# Altium footprint library footprints.PcbLib: 65 footprints (part 5 of 5)
Each footprint in its own frame and in the unit in brackets; x right, y up, seen from the top. Pads: shape width x height; smd on the part's side, far side on the other; paste and mask are expansions set on the pad; w line width, h text height; cw(c..) or ccw(c..) is an arc to the next point about the centre after c.
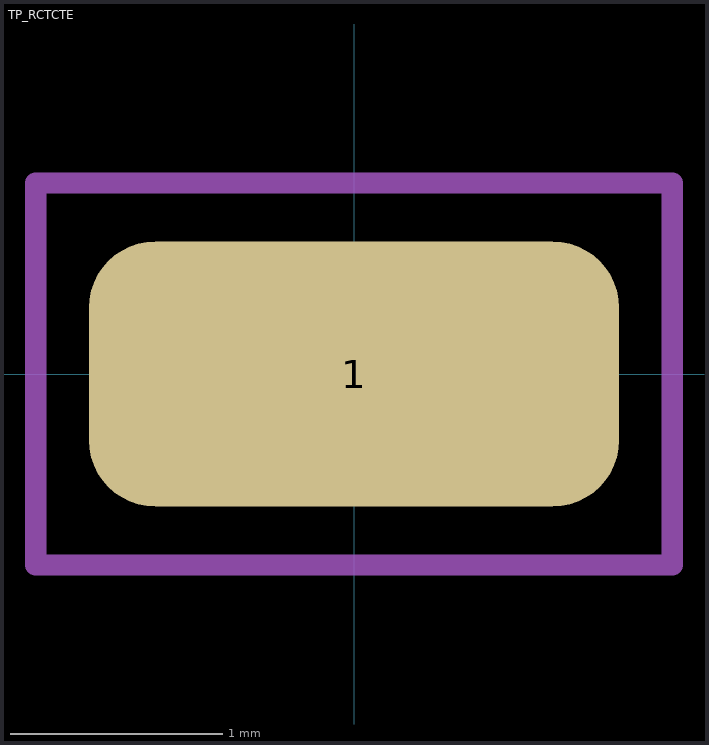
[diagram p4: the footprint, top view; thin cyan lines are the x and y axes]

## TP_RCTCTE [mm]
pads (1):
  rrect50% 2.5x1.25 smd: 1(0,0)
Mechanical 15:
  lines w0.1: -1.5,-0.9 1.5,-0.9 1.5,0.9 -1.5,0.9 -1.5,-0.9
3D body "RCTCTE.stp": height 1.44, standoff -0.02, extent -1.115,-0.625 1.115,0.625